# Altium footprint library IoT_Uni_Term_PcbLib.PcbLib: 21 footprints (part 1 of 2)
Each footprint in its own frame and in the unit in brackets; x right, y up, seen from the top. Pads: shape width x height; smd on the part's side, far side on the other; paste and mask are expansions set on the pad; w line width, h text height; cw(c..) or ccw(c..) is an arc to the next point about the centre after c.
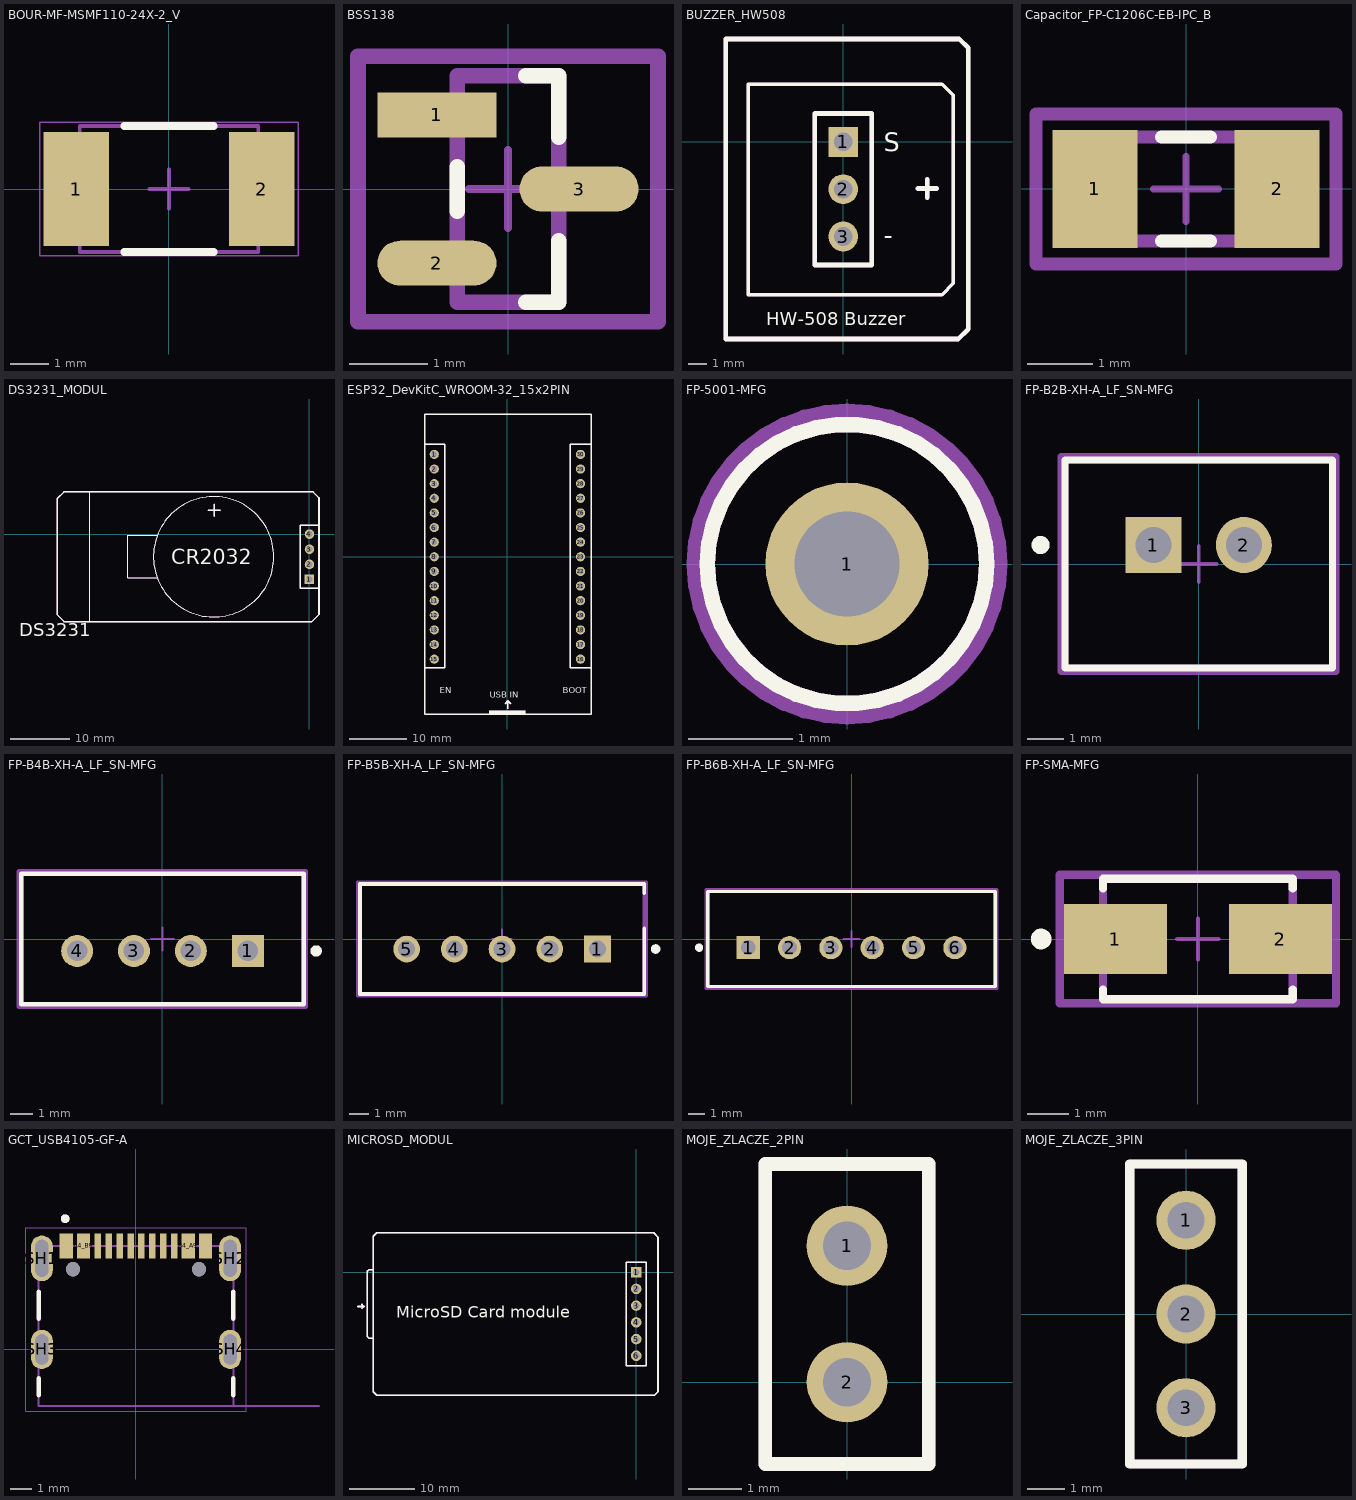
[diagram p0: the footprints below, top view; thin cyan lines are the x and y axes]

## BOUR-MF-MSMF110-24X-2_V [mm] "Chip Fuse, 2-Leads, Body 4.6x3.24mm"
height 1.6
pads (2):
  rect 1.68x2.95 smd: 1(-2.39,0) 2(2.39,0)
Top Overlay:
  lines w0.2: -1.15,-1.62 1.15,-1.62 ; -1.15,1.62 1.15,1.62
Top 3D Body:
  lines w0.1: -2.3,-1.62 2.3,-1.62 2.3,1.62 -2.3,1.62 -2.3,-1.62
Top Courtyard:
  lines w0.05: -3.33,-1.72 -3.33,1.72 3.33,1.72 3.33,-1.72 -3.33,-1.72
  lines w0.1: -0.5,0 0.5,0 ; 0,-0.5 0,0.5
3D body "mf-msmf110_24x.stp": height 1.15, standoff 0, extent -2.3,-1.62 2.3,1.62

## BSS138 [mm]
pads (3):
  rect 1.524x0.578 smd paste+0 mask+0: 1(-0.91,0.95)
  rrect100% 1.524x0.578 smd paste+0 mask+0: 2(-0.91,-0.95) 3(0.91,0)
Top Overlay:
  lines w0.2: -0.65,-0.286 -0.65,0.286 ; 0.227,-1.45 0.65,-1.45 0.65,-0.664 ; 0.227,1.45 0.65,1.45 0.65,0.664
Top Assembly:
  lines w0.2: -1.922,-1.7 -1.922,1.7 1.922,1.7 1.922,-1.7 -1.922,-1.7
  text ".Designator" at 0,-0.001 h1
Top 3D Body:
  lines w0.2: -0.65,-1.45 -0.65,1.45 0.65,1.45 0.65,-1.45 -0.65,-1.45
Top Courtyard:
  lines w0.2: -1.922,-1.7 -1.922,1.7 1.922,1.7 1.922,-1.7 -1.922,-1.7
Top Component Center:
  lines w0.1: -0.5,0 0.5,0 ; 0,-0.5 0,0.5
3D body "IC_ON_Semiconductor_NUD3112LT1G_eec.STEP": height 0.25, standoff 0, extent -1.922,-1.7 1.922,1.7

## BUZZER_HW508 [mm]
pads (3):
  rect 1.6x1.6 hole 1: 1(0,0)
  round 1.6 hole 1: 2(0,-2.54) 3(0,-5.08)
Top Overlay:
  lines w0.18: -5.1,-8.2 4.1,-8.2 5.3,-8.2 5.9,-7.6 5.9,2.5 5.3,3.1 4.1,3.1 -5.1,3.1 -5.1,-8.2
  lines w0.254: 4,-2.5 5,-2.5 ; 4.5,-3 4.5,-2 ; -6.3,-10.58 -6.3,5.52 6.23,5.52 6.7,5.05 6.7,-10.05 6.17,-10.58 -6.3,-10.58 ; -1.524,-6.604 -1.524,1.524 0,1.524 1.524,1.524 1.524,-6.604 -1.524,-6.604
  text "HW-508 Buzzer" at -4.124,-9.85 h0.7
  text "S" at 2.167,-0.5 h1
  text "-" at 2.167,-5.5 h1
Top Assembly:
  lines w0.18: -5.1,-8.2 4.1,-8.2 5.3,-8.2 5.9,-7.6 5.9,2.5 5.3,3.1 4.1,3.1 -5.1,3.1 -5.1,-8.2
  lines w0.254: 4,-2.5 5,-2.5 ; 4.5,-3 4.5,-2 ; -6.3,-10.58 -6.3,5.52 6.23,5.52 6.7,5.05 6.7,-10.05 6.17,-10.58 -6.3,-10.58 ; -1.524,-6.604 -1.524,1.524 0,1.524 1.524,1.524 1.524,-6.604 -1.524,-6.604
  text ".Designator" at -4.998,-0.333 h1
  text "HW-508 Buzzer" at -4.124,-9.85 h0.7
  text "S" at 2.167,-0.5 h1
  text "-" at 2.167,-5.5 h1
3D body: height 19, standoff 10.7, extent -6.3,-10.7 6.8,5.6

## Capacitor_FP-C1206C-EB-IPC_B [mm]
pads (2):
  rect 1.305x1.806 smd paste+0 mask+0: 1(-1.401,0) 2(1.401,0)
Top Overlay:
  lines w0.2: -0.373,-0.8 0.373,-0.8 ; -0.373,0.8 0.373,0.8
Top Assembly:
  lines w0.2: -2.303,-1.153 -2.303,1.153 2.303,1.153 2.303,-1.153 -2.303,-1.153
  text ".Designator" at 0,0.188 h1
Top 3D Body:
  lines w0.2: -1.6,-0.8 -1.6,0.8 1.6,0.8 1.6,-0.8 -1.6,-0.8
Top Courtyard:
  lines w0.2: -2.303,-1.153 -2.303,1.153 2.303,1.153 2.303,-1.153 -2.303,-1.153
Top Component Center:
  lines w0.1: -0.5,0 0.5,0 ; 0,-0.5 0,0.5
3D body "Cap_KEMET_C1206C472K4RACTU_eec.STEP": height 0.25, standoff 0, extent -2.303,-1.153 2.303,1.153

## DS3231_MODUL [mm]
pads (4):
  rect 1.6x1.6 hole 1: 1(0,-7.62)
  round 1.6 hole 1: 2(0,-5.08) 3(0,-2.54) 4(0,0)
Top Overlay:
  circle w0.18: c-16.129,-3.81 r10.121
  lines w0.18: -25.7,-7.3 -28.4,-7.3 -30.6,-7.3 -30.6,-6.4 -30.6,-0.2 -25.7,-0.2
  lines w0.2: -37,-14.7 -37,7
  lines w0.254: -17,4 -15,4 ; -16,3 -16,5 ; -42.467,-13.533 -42.467,5.933 -42.459,5.941 -41.3,7.1 0.6,7.1 1.6,6.1 1.6,-13.5 0.4,-14.7 -41.3,-14.7 -42.467,-13.533 ; -1.524,-9.144 -1.524,1.524 1.524,1.524 1.524,-9.144 -1.524,-9.144
  text "CR2032" at -23.21,-5.06 h2.5
  text "DS3231" at -48.861,-17.149 h2.2
Top Assembly:
  circle w0.18: c-16.129,-3.81 r10.121
  lines w0.18: -25.7,-7.3 -28.4,-7.3 -30.6,-7.3 -30.6,-6.4 -30.6,-0.2 -25.7,-0.2
  lines w0.2: -37,-14.7 -37,7
  lines w0.254: -17,4 -15,4 ; -16,3 -16,5 ; -42.467,-13.533 -42.467,5.933 -42.459,5.941 -41.3,7.1 0.6,7.1 1.6,6.1 1.6,-13.5 0.4,-14.7 -41.3,-14.7 -42.467,-13.533 ; -1.524,-9.144 -1.524,1.524 1.524,1.524 1.524,-9.144 -1.524,-9.144
  text "CR2032" at -23.21,-5.06 h2.5
  text ".Designator" at -9.997,-0.666 h2
3D body: height 19.5, standoff 10.7, extent -42.7,-14.9 1.777,7.154

## ESP32_DevKitC_WROOM-32_15x2PIN [mm]
pads (30):
  round 1.6 hole 1: 1(-12.7,17.78) 2(-12.7,15.24) 3(-12.7,12.7) 4(-12.7,10.16) 5(-12.7,7.62) 6(-12.7,5.08) 7(-12.7,2.54) 8(-12.7,0) 9(-12.7,-2.54) 10(-12.7,-5.08) 11(-12.7,-7.62) 12(-12.7,-10.16) 13(-12.7,-12.7) 14(-12.7,-15.24) 15(-12.7,-17.78) 16(12.7,-17.78) 17(12.7,-15.24) 18(12.7,-12.7) 19(12.7,-10.16) 20(12.7,-7.62) 21(12.7,-5.08) 22(12.7,-2.54) 23(12.7,0) 24(12.7,2.54) 25(12.7,5.08) 26(12.7,7.62) 27(12.7,10.16) 28(12.7,12.7) 29(12.7,15.24) 30(12.7,17.78)
Top Overlay:
  rectangle: -3.175,-27.305 3.175,-26.67
  lines w0.254: -14.224,-19.304 -10.922,-19.304 -10.922,19.558 -14.224,19.558 ; 0.1,-25.3 0.1,-26.4 0.1,-25 ; 0.6,-25.5 0.1,-25 ; 11.303,19.558 14.605,19.558 ; 11.684,19.558 10.9,19.558 10.9,-19.304 11.303,-19.304 14.605,-19.304 ; -14.395,-27.305 14.605,-27.305 ; -14.395,-27.305 -14.395,24.8 ; -14.395,-27.305 14.605,-27.305 ; -14.395,-27.305 -14.395,24.8 ; -14.395,-27.305 14.605,-27.305 ; -14.395,-27.305 -14.395,24.8 ; -14.395,-27.305 14.605,-27.305 ; -14.395,-27.305 -14.395,24.8 ; -14.395,24.8 14.605,24.8 ; -14.395,24.8 14.605,24.8 ; -14.395,24.8 14.605,24.8 ; -14.395,24.8 14.605,24.8 ; 0.1,-25 -0.4,-25.5 0.1,-25 ; 14.605,-27.305 14.605,24.8 ; 14.605,-27.305 14.605,24.8 ; 14.605,-27.305 14.605,24.8 ; 14.605,-27.305 14.605,24.8
  text "USB IN" at -3.024,-24.462 h1.1
  text "EN" at -11.738,-23.676 h1.1
  text "BOOT" at 9.598,-23.676 h1.1
Top Assembly:
  rectangle: -3.175,-27.305 3.175,-26.67
  lines w0.254: -14.224,-19.304 -10.922,-19.304 -10.922,19.558 -14.224,19.558 ; 0.1,-25.3 0.1,-26.4 0.1,-25 ; 0.6,-25.5 0.1,-25 ; 11.303,19.558 14.605,19.558 ; 11.684,19.558 10.9,19.558 10.9,-19.304 11.303,-19.304 14.605,-19.304 ; 0.1,-25 -0.4,-25.5 0.1,-25
  text ".Designator" at -9.997,-0.666 h2
  text "USB IN" at -3.024,-24.462 h1.1
  text "EN" at -11.738,-23.676 h1.1
  text "BOOT" at 9.598,-23.676 h1.1
3D body: height 15, standoff 10, extent -14.395,-27.305 14.605,24.8

## FP-5001-MFG [mm]
pads (1):
  round 1.57 hole 1.016 paste-2539.97 mask+0: 1(0,0)
Top Overlay:
  circle w0.15: c0,0 r1.345
Top Assembly:
  text ".Designator" at 0,0.188 h1
Top 3D Body:
  circle w0.15: c0,0 r1.345
Top Courtyard:
  lines w0.2: -1.445,0 ccw(c0,0) 1.445,0 ccw(c0,0) -1.445,0
Top Component Center:
  lines w0.1: -0.5,0 0.5,0 ; 0,-0.5 0,0.5
3D body "Conn_Keystone_5001_eec.STEP": height 0.25, standoff 0, extent -1.445,-1.445 1.445,1.445

## FP-B2B-XH-A_LF_SN-MFG [mm]
pads (2):
  rect 1.55x1.55 hole 1 paste-2539.97 mask+0: 1(-1.25,0.525)
  round 1.55 hole 1 paste-2539.97 mask+0: 2(1.25,0.525)
Top Overlay:
  circle w0.25: c-4.375,0.525 r0.125
  lines w0.2: -3.7,-2.875 -3.7,2.875 3.7,2.875 3.7,-2.875 -3.7,-2.875
Top Assembly:
  lines w0.2: -3.8,-2.975 -3.8,2.975 3.8,2.975 3.8,-2.975 -3.8,-2.975
  text ".Designator" at 0,0.188 h1
Top 3D Body:
  lines w0.2: -3.7,-2.875 -3.7,2.875 3.7,2.875 3.7,-2.875 -3.7,-2.875
Top Courtyard:
  lines w0.2: -3.8,-2.975 -3.8,2.975 3.8,2.975 3.8,-2.975 -3.8,-2.975
Top Component Center:
  lines w0.1: -0.5,0 0.5,0 ; 0,-0.5 0,0.5
3D body "Conn_JST_B2B-XH-A_LF_SN_eec.STEP": height 0.25, standoff 0, extent -3.8,-2.975 3.8,2.975

## FP-B4B-XH-A_LF_SN-MFG [mm]
pads (4):
  rect 1.4x1.4 hole 0.9 paste-2539.97 mask+0: 1(3.75,-0.525)
  round 1.4 hole 0.9 paste-2539.97 mask+0: 2(1.25,-0.525) 3(-1.25,-0.525) 4(-3.75,-0.525)
Top Overlay:
  circle w0.25: c6.75,-0.525 r0.125
  lines w0.2: -6.2,-2.875 -6.2,2.875 6.2,2.875 6.2,-2.875 -6.2,-2.875
Top Assembly:
  lines w0.2: -6.3,-2.975 -6.3,2.975 6.3,2.975 6.3,-2.975 -6.3,-2.975
  text ".Designator" at 0,0.188 h1
Top 3D Body:
  lines w0.2: -6.2,-2.875 -6.2,2.875 6.2,2.875 6.2,-2.875 -6.2,-2.875
Top Courtyard:
  lines w0.2: -6.3,-2.975 -6.3,2.975 6.3,2.975 6.3,-2.975 -6.3,-2.975
Top Component Center:
  lines w0.1: -0.5,0 0.5,0 ; 0,-0.5 0,0.5
3D body "Conn_JST_B4B-XH-A_LF_SN_eec.STEP": height 0.25, standoff 0, extent -6.3,-2.975 6.3,2.975

## FP-B5B-XH-A_LF_SN-MFG [mm]
pads (5):
  rect 1.4x1.4 hole 0.9 paste-2539.97 mask+0: 1(5,-0.525)
  round 1.4 hole 0.9 paste-2539.97 mask+0: 2(2.5,-0.525) 3(0,-0.525) 4(-2.5,-0.525) 5(-5,-0.525)
Top Overlay:
  circle w0.25: c8.05,-0.525 r0.125
  lines w0.2: 7.45,0.55 7.45,-2.875 -7.45,-2.875 -7.45,2.875 7.45,2.875 7.45,2.4
Top Assembly:
  lines w0.2: -7.55,-2.975 -7.55,2.975 7.55,2.975 7.55,-2.975 -7.55,-2.975
  text ".Designator" at 0,0.188 h1
Top 3D Body:
  lines w0.2: -7.45,-2.875 -7.45,2.875 7.45,2.875 7.45,-2.875 -7.45,-2.875
Top Courtyard:
  lines w0.2: -7.55,-2.975 -7.55,2.975 7.55,2.975 7.55,-2.975 -7.55,-2.975
Top Component Center:
  lines w0.1: -0.5,0 0.5,0 ; 0,-0.5 0,0.5
3D body "Conn_JST_B5B-XH-AM_LF_SN_eec.STEP": height 0.25, standoff 0, extent -7.55,-2.975 7.55,2.975

## FP-B6B-XH-A_LF_SN-MFG [mm]
pads (6):
  rect 1.4x1.4 hole 0.9 paste-2539.97 mask+0: 1(-6.25,-0.525)
  round 1.4 hole 0.9 paste-2539.97 mask+0: 2(-3.75,-0.525) 3(-1.25,-0.525) 4(1.25,-0.525) 5(3.75,-0.525) 6(6.25,-0.525)
Top Overlay:
  circle w0.25: c-9.225,-0.525 r0.125
  lines w0.2: -8.7,-2.875 -8.7,2.875 8.7,2.875 8.7,-2.875 -8.7,-2.875
Top Assembly:
  lines w0.2: -8.8,-2.975 -8.8,2.975 8.8,2.975 8.8,-2.975 -8.8,-2.975
  text ".Designator" at 0,0.188 h1
Top 3D Body:
  lines w0.2: -8.7,-2.875 -8.7,2.875 8.7,2.875 8.7,-2.875 -8.7,-2.875
Top Courtyard:
  lines w0.2: -8.8,-2.975 -8.8,2.975 8.8,2.975 8.8,-2.975 -8.8,-2.975
Top Component Center:
  lines w0.1: -0.5,0 0.5,0 ; 0,-0.5 0,0.5
3D body "Conn_JST_B6B-XH-A_LF_SN_eec.STEP": height 0.25, standoff 0, extent -8.8,-2.975 8.8,2.975

## FP-SMA-MFG [mm]
pads (2):
  rect 2.5x1.7 smd paste+0 mask+0: 1(-2,0) 2(2,0)
Top Overlay:
  circle w0.25: c-3.8,0 r0.125
  lines w0.2: -2.3,-1.225 -2.3,-1.46 2.3,-1.46 2.3,-1.225 ; -2.3,1.225 -2.3,1.46 2.3,1.46 2.3,1.225
Top Assembly:
  lines w0.2: -3.35,-1.56 3.35,-1.56 3.35,1.56 -3.35,1.56 -3.35,-1.56
  text ".Designator" at 0,0.188 h1
Top 3D Body:
  lines w0.2: -2.3,-1.46 2.3,-1.46 2.3,1.46 -2.3,1.46 -2.3,-1.46
Top Courtyard:
  lines w0.2: -3.35,-1.56 3.35,-1.56 3.35,1.56 -3.35,1.56 -3.35,-1.56
Top Component Center:
  lines w0.1: -0.5,0 0.5,0 ; 0,-0.5 0,0.5
3D body "Diode_Diodes_Inc_SBRT5A50SA-13_eec.STEP": height 0.25, standoff 0, extent -3.35,-1.56 3.35,1.56

## GCT_USB4105-GF-A [mm]
height 3.31
pads (18):
  rect 0.6x1.15 smd mask+0.05: A1_B12(-3.2,4.755) A4_B9(-2.4,4.755) B1_A12(3.2,4.755) B4_A9(2.4,4.755)
  rect 0.3x1.15 smd mask+0.05: A5(-1.25,4.755) A6(-0.25,4.755) A7(0.25,4.755) A8(1.25,4.755) B5(1.75,4.755) B6(0.75,4.755) B7(-0.75,4.755) B8(-1.75,4.755)
  oval 1x2.1 hole 0.6 slot 1.7 at 90 deg: SH1(-4.32,4.18) SH2(4.32,4.18)
  oval 1x1.8 hole 0.6 slot 1.4 at 90 deg: SH3(-4.32,0) SH4(4.32,0)
  round 0.65 hole 0.65 unplated: ""(-2.89,3.68) ""(2.89,3.68)
Top Overlay:
  circle w0.2: c-3.25,6 r0.1
  lines w0.2: -4.47,-2.1 -4.47,-1.32 ; -4.47,1.4 -4.47,2.65 ; 4.47,-2.1 4.47,-1.32 ; 4.47,1.4 4.47,2.65
Top 3D Body:
  circle w0.2: c-3.25,6 r0.1
  lines w0.1: 8.4,-2.6 4.47,-2.6 ; 4.47,-2.6 4.47,4.75 -4.47,4.75 -4.47,-2.6 4.47,-2.6
  text "PCB EDGE" at 5.4,-2.5 h0.41
Top Courtyard:
  lines w0.05: -5.07,-2.85 -5.07,5.58 5.07,5.58 5.07,-2.85 -5.07,-2.85
3D body "USB4105-GF-A--3DModel-STEP-510211.STEP": height 3.32, standoff -1.09, extent -4.47,-2.6 4.47,5.11

## MICROSD_MODUL [mm]
pads (6):
  rect 1.6x1.6 hole 1: 1(0,0)
  round 1.6 hole 1: 2(0,-2.54) 3(0,-5.08) 4(0,-7.62) 5(0,-10.16) 6(0,-12.7)
Top Overlay:
  lines w0.254: -42.3,-5.2 -42,-5.2 -41.4,-5.2 ; -41.7,-5.5 -41.4,-5.2 ; -41.7,-4.9 -41.4,-5.2 ; -40.005,-10.033 -40.64,-10.033 -40.894,-9.779 -40.894,-9.652 -40.894,0.127 -40.64,0.381 -40.005,0.381 ; 1.524,-11.684 1.524,1.524 -1.524,1.524 -1.524,-11.684 -1.524,-14.224 1.524,-14.224 1.524,-10.668 ; -40.005,-18.161 -39.466,-18.7 2.763,-18.7 3.3,-18.163 3.3,5.336 2.636,6 -39.466,6 -40.005,5.461 -40.005,-18.161
  text "MicroSD Card module" at -36.495,-6.9 h1.8
Top Assembly:
  lines w0.254: -42.3,-5.2 -42,-5.2 -41.4,-5.2 ; -41.7,-5.5 -41.4,-5.2 ; -41.7,-4.9 -41.4,-5.2 ; -40.005,-10.033 -40.64,-10.033 -40.894,-9.779 -40.894,-9.652 -40.894,0.127 -40.64,0.381 -40.005,0.381 ; 1.524,-11.684 1.524,1.524 -1.524,1.524 -1.524,-11.684 -1.524,-14.224 1.524,-14.224 1.524,-10.668 ; -40.005,-18.161 -39.466,-18.7 2.763,-18.7 3.3,-18.163 3.3,5.336 2.636,6 -39.466,6 -40.005,5.461 -40.005,-18.161
  text ".Designator" at -9.997,-0.666 h2
  text "MicroSD Card module" at -36.495,-6.9 h1.8
3D body: height 14, standoff 10.7, extent -40.1,-18.8 3.4,6.1

## MOJE_ZLACZE_2PIN [mm]
pads (2):
  round 1.5 hole 0.9: 1(0,2.54) 2(0,0)
Top Overlay:
  lines w0.254: -1.524,-1.524 -1.524,4.064 0,4.064 1.524,4.064 1.524,-1.524 -1.524,-1.524
Top Assembly:
  lines w0.254: -1.524,-1.524 -1.524,4.064 0,4.064 1.524,4.064 1.524,-1.524 -1.524,-1.524
  text ".Designator" at -3.499,-0.233 h0.7

## MOJE_ZLACZE_3PIN [mm]
pads (3):
  round 1.6 hole 1: 1(0,2.54) 2(0,0) 3(0,-2.54)
Top Overlay:
  lines w0.254: -1.524,-4.064 -1.524,4.064 0,4.064 1.524,4.064 1.524,-4.064 -1.524,-4.064
Top Assembly:
  lines w0.254: -1.524,-4.064 -1.524,4.064 0,4.064 1.524,4.064 1.524,-4.064 -1.524,-4.064
  text ".Designator" at -3.499,-0.233 h0.7